# Altium footprint library new-version2.PcbLib: 88 footprints (part 4 of 6)
Each footprint in its own frame and in the unit in brackets; x right, y up, seen from the top. Pads: shape width x height; smd on the part's side, far side on the other; paste and mask are expansions set on the pad; w line width, h text height; cw(c..) or ccw(c..) is an arc to the next point about the centre after c.
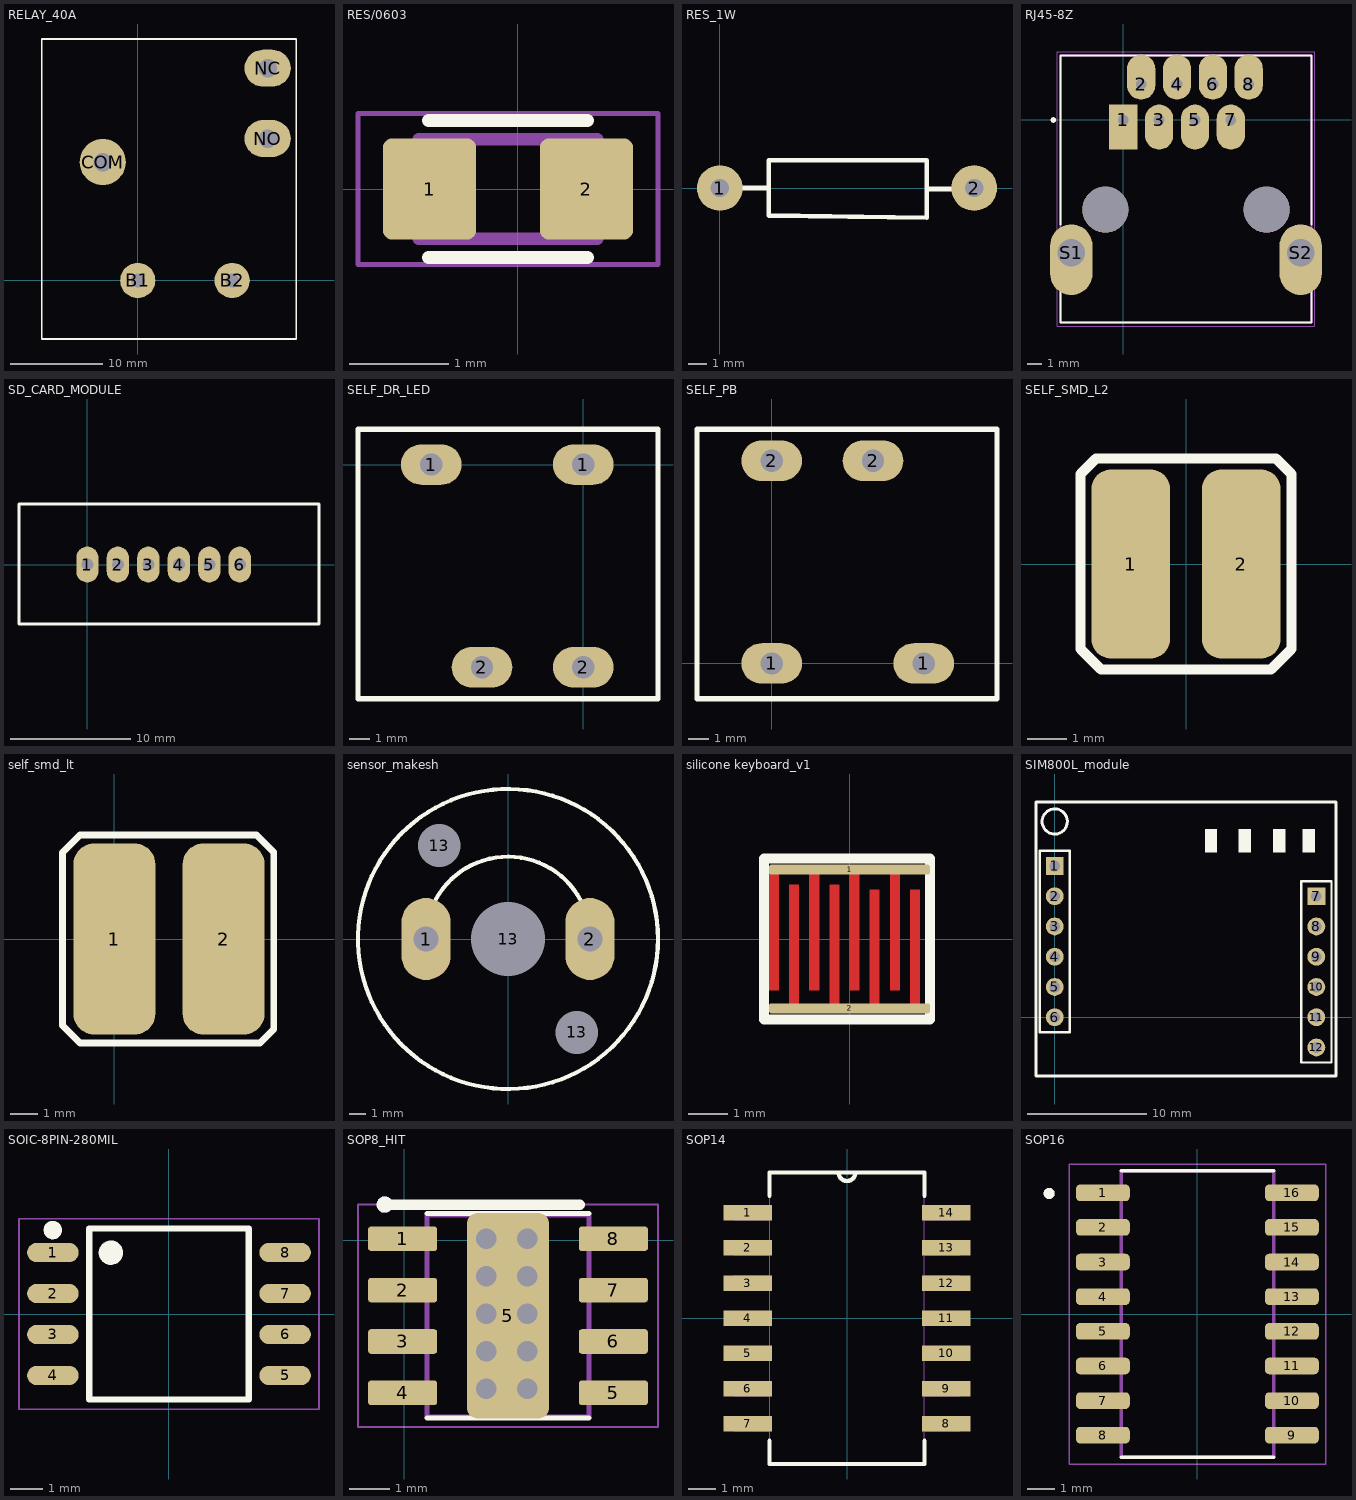
[diagram p3: the footprints below, top view; thin cyan lines are the x and y axes]

## RELAY_40A [mm]
pads (5):
  round 3.81 hole 1.5: B1(0,0) B2(10.2,0)
  round 5 hole 2: COM(-3.775,12.785)
  oval 5x4 hole 2: NC(14.025,22.925) NO(14.025,15.325)
Top Overlay:
  lines w0.2: -10.375,-6.325 17.125,-6.325 17.125,26.075 -10.375,26.075 -10.375,-6.325

## RES/0603 [mm]
pads (2):
  rrect20% 0.94x1.02 smd: 1(-0.889,0) 2(0.691,0)
Top Overlay:
  lines w0.127: -0.899,-0.69 0.701,-0.69 ; -0.899,0.69 0.701,0.69
Mechanical 13:
  lines w0.127: -0.999,-0.5 0.801,-0.5 0.801,0.5 -0.999,0.5 -0.999,-0.5
Mechanical 15:
  lines w0.05: -1.609,-0.76 1.411,-0.76 1.411,0.76 -1.609,0.76 -1.609,-0.76
3D body "RES-0603.STEP": height 0.43, standoff -0.03, extent -0.928,-0.406 0.672,0.394

## RES_1W [mm]
pads (2):
  round 2.5 hole 1: 1(0,0) 2(13.9,0)
Top Overlay:
  lines w0.254: 0.113,0 2.667,0 ; 11.303,-0.051 13.857,-0.051 ; 2.667,0 2.667,-1.5 11.303,-1.627 11.303,1.524 2.667,1.524 2.667,0

## RJ45-8Z [mm]
pads (12):
  rect 2x3.2 / inner rect 2x2 / far side rect 2x2 hole 0.762 copper offset 0,-0.5: 1(0,0)
  oval 2x3.2 hole 0.762 copper offset 0,0.5: 2(1.27,2.54) 4(3.81,2.54) 6(6.35,2.54) 8(8.89,2.54)
  oval 2x3.2 / inner round 2 / far side round 2 hole 0.762 copper offset 0,-0.5: 3(2.54,0) 5(5.08,0) 7(7.62,0)
  oval 3x5 / inner oval 4x3 / far side oval 4x3 hole 1.93 copper offset 0,-0.5: S1(-3.683,-9.398) S2(12.573,-9.398)
  round 3.251 hole 3.251 unplated: ""(-1.27,-6.35) ""(10.16,-6.35)
Top Overlay:
  circle w0.2: c-4.953,0 r0.1
  lines w0.127: -4.445,-11.239 -4.445,-14.35 13.335,-14.351 ; -4.445,-7.429 -4.445,4.572 ; -4.439,4.572 -4.445,4.572 ; 13.334,-14.353 13.334,-13.779 13.335,-13.779 13.335,-11.239 ; 13.335,-7.429 13.335,4.572 -4.445,4.572
Mechanical 13:
  lines w0.127: -4.445,-14.351 -4.445,-11.862 -4.445,4.572 13.335,4.572 13.335,-11.862 13.335,-14.351 -4.445,-14.351
Mechanical 15:
  lines w0.05: -4.695,-14.601 -4.695,4.822 13.585,4.822 13.585,-14.601 -4.695,-14.601
3D body "RJ45-8Z--3DModel-STEP-56544.STEP": height 3.94, standoff -12.57, extent -4.442,-14.288 13.338,3.746

## SD_CARD_MODULE [mm]
pads (6):
  oval 1.85x3 hole 1: 1(0,0) 2(2.54,0) 3(5.08,0) 4(7.62,0) 5(10.16,0) 6(12.7,0)
Top Overlay:
  lines w0.254: -5.696,-4.953 19.304,-4.953 19.304,5.047 -5.696,5.047 -5.696,-4.953

## SELF_DR_LED [mm]
pads (4):
  oval 3x2 hole 1.1: 1(-7.5,0) 1(0,0) 2(-5,-10) 2(0,-10)
Top Overlay:
  lines w0.254: -11.117,-11.557 3.683,-11.557 3.683,1.743 -9.812,1.743 -11.117,1.743 -11.117,-11.557

## SELF_PB [mm]
pads (4):
  oval 3x2 hole 1.1: 1(0,-0.003) 1(7.5,-0.003) 2(0,9.997) 2(5,9.997)
Top Overlay:
  lines w0.254: -3.683,-1.746 -3.683,11.554 11.117,11.554 11.117,-1.746 9.812,-1.746 -3.683,-1.746

## SELF_SMD_L2 [mm]
pads (2):
  rrect50% 2x4.8 smd: 1(-1.4,0) 2(1.4,0)
Top Overlay:
  lines w0.254: -2.667,-2.159 -2.667,2.286 -2.286,2.667 2.286,2.667 2.667,2.286 2.667,-2.159 2.159,-2.667 -2.159,-2.667 -2.667,-2.159

## self_smd_lt [mm]
pads (2):
  rrect50% 3x7 smd: 1(0,0) 2(4,0)
Top Overlay:
  lines w0.254: -1.905,-3.175 -1.27,-3.81 5.334,-3.81 5.842,-3.302 5.842,3.175 5.207,3.81 -1.27,3.81 -1.905,3.175 -1.905,-3.175

## sensor_makesh [mm]
pads (5):
  oval 3x5 hole 1.5: 1(-5,0) 2(5,0)
  round 1.524 hole 2.6: 13(-4.2,5.7) 13(4.2,-5.7)
  round 1.524 hole 4.5: 13(0,0)
Top Overlay:
  circle w0.254: c0,0 r9.15
  lines w0.254: -4.402,2.421 cw(c0,0) 4.429,2.373

## silicone keyboard_v1 [mil]
pads (2):
  rrect50% 160x10 smd paste+0 mask+0: 1(0,68.9) 2(0,-68.9)
Top Layer:
  rectangle: -20,-66.1 -10,53.9
  rectangle: 0,-51.1 10,68.9
  rectangle: -40,-51.1 -30,68.9
  rectangle: -60,-66.1 -50,53.9
  rectangle: -80,-51.1 -70,68.9
  rectangle: 40,-51.1 50,65
  rectangle: 20,-71.1 30,48.9
  rectangle: 60,-71.1 70,48.9
Top Overlay:
  lines w10: -85,-80 -85,80 -75,80 80,80 80,-80 -85,-80

## SIM800L_module [mm]
pads (12):
  rect 1.5x1.5 hole 0.9: 1(0,12.7) 7(21.971,10.16)
  round 1.5 hole 0.9: 2(0,10.16) 3(0,7.62) 4(0,5.08) 5(0,2.54) 6(0,0) 8(21.971,7.62) 9(21.971,5.08) 10(21.971,2.54) 11(21.971,0) 12(21.971,-2.54)
Top Overlay:
  rectangle: 12.598,13.818 13.64,15.824
  rectangle: 15.443,13.818 16.485,15.824
  rectangle: 18.339,13.818 19.38,15.824
  rectangle: 20.828,13.818 21.869,15.824
  lines w0.2: -1.27,-1.27 1.27,-1.27 1.27,13.97 -1.27,13.97 -1.27,-1.27 ; 20.701,-3.81 23.241,-3.81 23.241,11.43 20.701,11.43 20.701,-3.81
  lines w0.254: 1.057,16.46 ccw(c0,16.434) 1.057,16.434 ; -1.575,-4.953 23.622,-4.953 23.622,18.085 -1.575,18.085 -1.575,-4.953

## SOIC-8PIN-280MIL [mm]
pads (8):
  oval 1.6x0.6 smd: 1(-3.596,1.905) 2(-3.596,0.635) 3(-3.596,-0.635) 4(-3.596,-1.905) 5(3.604,-1.905) 6(3.604,-0.635) 7(3.604,0.635) 8(3.604,1.905)
Top Overlay:
  circle w0.127: c-1.796,1.9 r0.316
  circle w0.127: c-1.796,1.9 r0.224
  circle w0.127: c-1.796,1.9 r0.141
  circle w0.127: c-1.796,1.9 r0.1
  circle w0.127: c-1.796,1.8 r0.1
  circle w0.127: c-3.596,2.6 r0.224
  circle w0.127: c-3.496,2.6 r0.1
  circle w0.127: c-3.596,2.6 r0.1
  lines w0.2: -2.471,-2.65 2.479,-2.65 2.479,2.65 -2.471,2.65 -2.471,-2.65
Mechanical 15:
  lines w0.05: -4.646,-2.95 4.654,-2.95 4.654,2.95 -4.646,2.95 -4.646,-2.95
3D body "SOIC-8PIN-280MIL.STEP": height 2.16, standoff 0, extent -3.994,-2.593 3.986,2.647

## SOP8_HIT [mm]
pads (19):
  rrect25% 1.71x0.61 smd: 1(-0.034,0.038) 2(-0.034,-1.232) 3(-0.034,-2.502) 4(-0.034,-3.772) 5(5.176,-3.772) 6(5.176,-2.502) 7(5.176,-1.232) 8(5.176,0.038)
  round 0 hole 0.5: 5(2.032,-3.67) 5(2.032,-2.743) 5(2.032,-1.816) 5(2.032,-0.889) 5(2.032,0.038) 5(3.048,-3.67) 5(3.048,-2.743) 5(3.048,-1.816) 5(3.048,-0.889) 5(3.048,0.038)
  rrect25% 2.032x5.08 smd: 5(2.571,-1.867)
Top Overlay:
  circle w0.2: c-0.477,0.883 r0.1
  lines w0.127: 0.571,-4.397 4.571,-4.397 ; 0.571,0.663 4.571,0.663
  lines w0.254: -0.477,0.883 4.351,0.883
Mechanical 13:
  circle w0.2: c-0.477,0.883 r0.1
  lines w0.127: 0.571,-4.367 4.571,-4.367 4.571,0.633 0.571,0.633 0.571,-4.367
Mechanical 15:
  lines w0.05: -1.139,-4.617 6.281,-4.617 6.281,0.883 -1.139,0.883 -1.139,-4.617
3D body "step_temp.STEP": height 1.75, standoff 0, extent -0.429,-4.317 5.571,0.583

## SOP14 [mil]
pads (14):
  rect 69x22 smd: 1(-141,150) 2(-141,100) 3(-141,50) 4(-141,0) 5(-141,-50) 6(-141,-100) 7(-141,-150) 8(141,-150) 9(141,-100) 10(141,-50) 11(141,0) 12(141,50) 13(141,100) 14(141,150)
Top Overlay:
  lines w6: -110,-174 -110,-207 110,-207 110,-174 ; -110,174 -110,207 -12,207 ; 110,174 110,207 12,207 ; -12,207 ccw(c0,207) 12,207 ; -12,207 12,207
Mechanical 13:
  lines w0: -12,207 ccw(c0,207) 12,207 ; -12,207 -110,207 -110,-207 110,-207 110,207 12,207 ; -12,207 12,207 ; -161,-160 -110,-160 -110,-140 -161,-140 -161,-160 ; -161,-110 -110,-110 -110,-90 -161,-90 -161,-110 ; -161,-60 -110,-60 -110,-40 -161,-40 -161,-60 ; -161,-10 -110,-10 -110,10 -161,10 -161,-10 ; -161,40 -110,40 -110,60 -161,60 -161,40 ; -161,90 -110,90 -110,110 -161,110 -161,90 ; -161,140 -110,140 -110,160 -161,160 -161,140 ; 110,-160 161,-160 161,-140 110,-140 110,-160 ; 110,-110 161,-110 161,-90 110,-90 110,-110 ; 110,-60 161,-60 161,-40 110,-40 110,-60 ; 110,-10 161,-10 161,10 110,10 110,-10 ; 110,40 161,40 161,60 110,60 110,40 ; 110,90 161,90 161,110 110,110 110,90 ; 110,140 161,140 161,160 110,160 110,140

## SOP16 [mm]
pads (16):
  rrect50% 1.97x0.61 smd: 1(-3.464,4.445) 2(-3.464,3.175) 3(-3.464,1.905) 4(-3.464,0.635) 5(-3.464,-0.635) 6(-3.464,-1.906) 7(-3.464,-3.175) 8(-3.464,-4.445) 9(3.466,-4.445) 10(3.466,-3.175) 11(3.466,-1.905) 12(3.466,-0.635) 13(3.466,0.635) 14(3.466,1.905) 15(3.466,3.175) 16(3.466,4.445)
Top Overlay:
  circle w0.2: c-5.434,4.42 r0.1
  lines w0.127: -2.799,-5.25 2.801,-5.25 ; -2.799,5.25 2.801,5.25
Mechanical 13:
  circle w0.2: c-5.434,4.42 r0.1
  lines w0.127: -2.799,-5.25 2.801,-5.25 2.801,5.25 -2.799,5.25 -2.799,-5.25
Mechanical 15:
  lines w0.05: -4.699,-5.5 4.701,-5.5 4.701,5.5 -4.699,5.5 -4.699,-5.5
3D body "SOP16.STEP": height 2, standoff 0, extent -3.789,-5.089 4.011,5.111